# Altium schematic symbol library XC6206P302MR-G.SchLib: 1 symbol
Pins are listed as number, name and electrical type; pins without a type are passive.

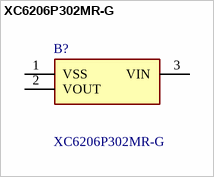
[diagram p0: symbol XC6206P302MR-G]

## XC6206P302MR-G
designator B?
1UA LOW QUIESCENT 3 TERMINAL, LO; Manufacturer_Name: Torex; Geometry.Height: 1.3mm; Mouser Part Number: 865-XC6206P302MR-G; Mouser Price/Stock: https://www.mouser.co.uk/ProductDetail/Torex-Semiconductor/XC6206P302MR-G?qs=AsjdqWjXhJ%2FCPGHa4B8pZA%3D%3D; Manufacturer_Part_Number: XC6206P302MR-G; Datasheet Link: https://www.torexsemi.com/file/xc6206/XC6206.pdf
footprint SOT95P280X130-3N
pins: 1 VSS, 2 VOUT, 3 VIN